# Altium footprint library IC_SMD_QUAD.PcbLib: 112 footprints (part 1 of 7)
Each footprint in its own frame and in the unit in brackets; x right, y up, seen from the top. Pads: shape width x height; smd on the part's side, far side on the other; paste and mask are expansions set on the pad; w line width, h text height; cw(c..) or ccw(c..) is an arc to the next point about the centre after c.
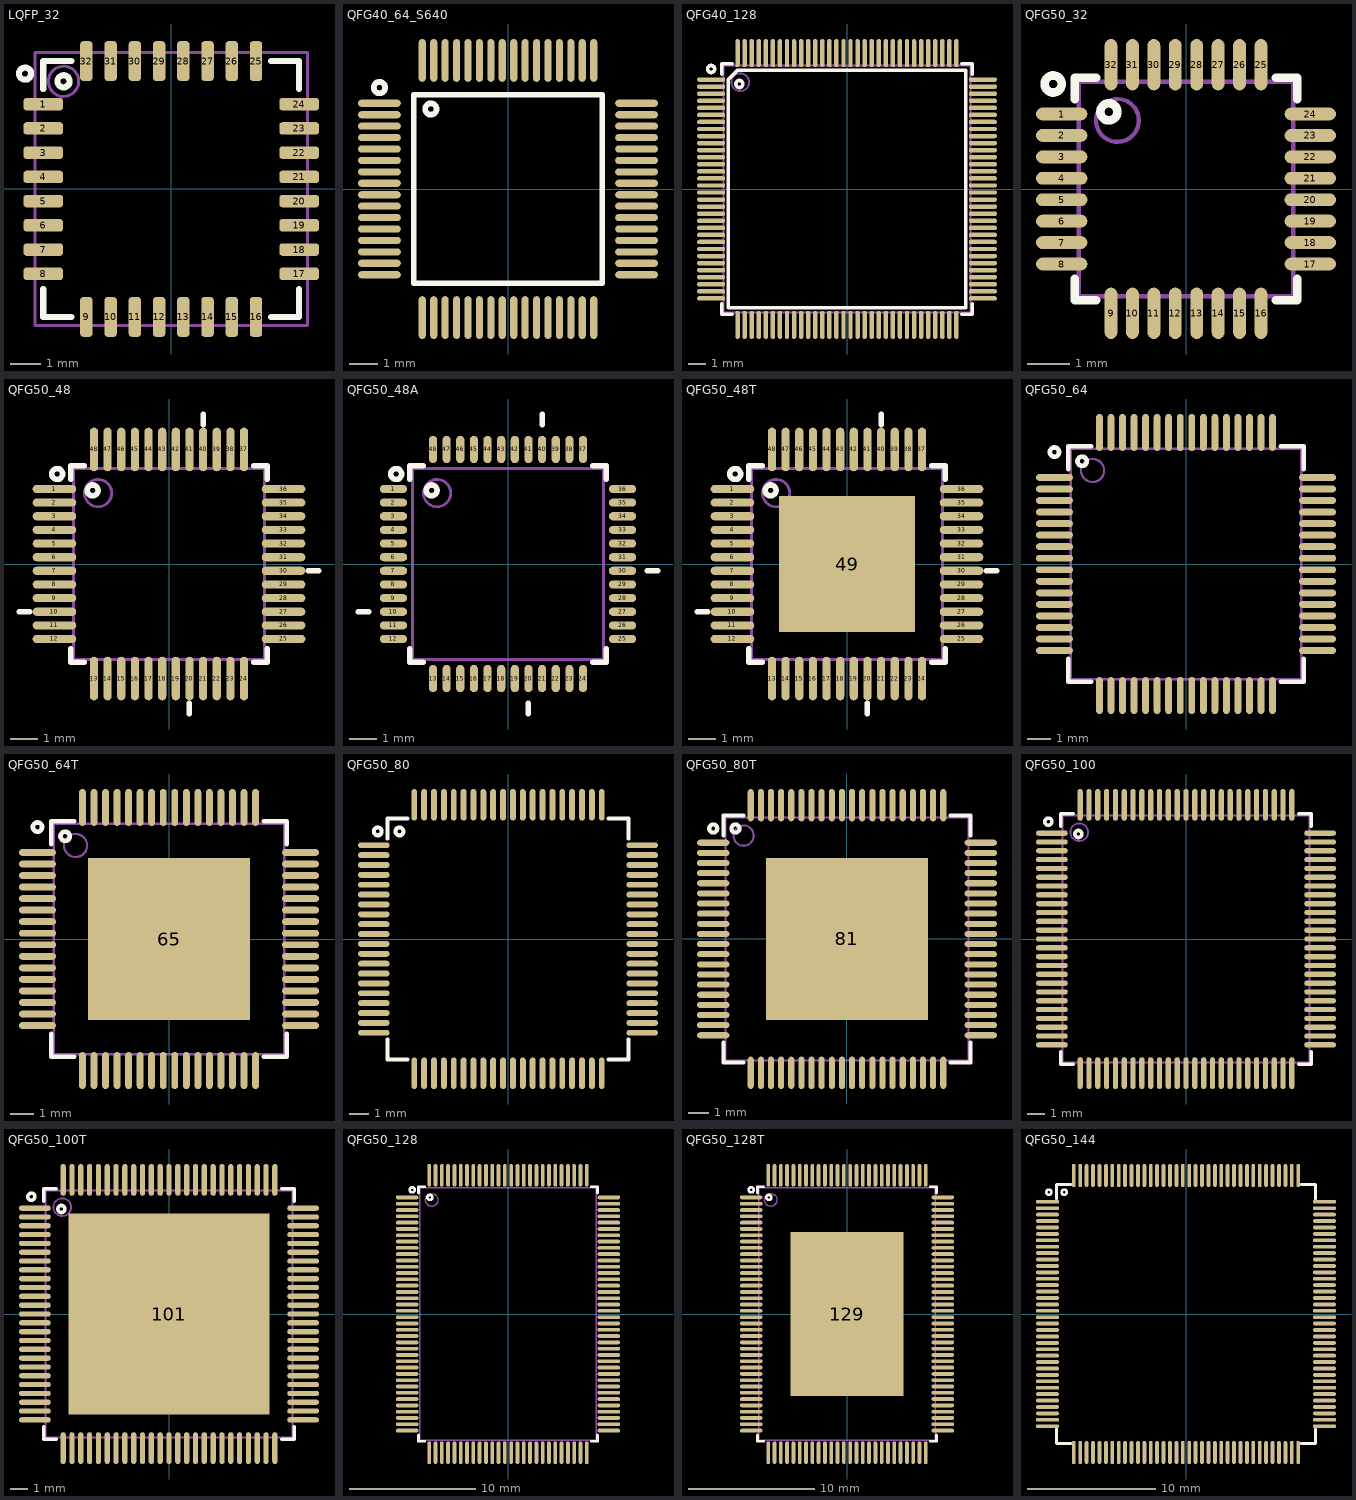
[diagram p0: the footprints below, top view; thin cyan lines are the x and y axes]

## LQFP_32 [mm] "LQFP 32-pin (7.0 x 7.0 x 1.4 mm)"
height 1
pads (32):
  rrect50% 1.31x0.41 smd mask+0.05: 1(-4.225,2.8) 2(-4.225,2) 3(-4.225,1.2) 4(-4.225,0.4) 5(-4.225,-0.4) 6(-4.225,-1.2) 7(-4.225,-2) 8(-4.225,-2.8) 17(4.225,-2.8) 18(4.225,-2) 19(4.225,-1.2) 20(4.225,-0.4) 21(4.225,0.4) 22(4.225,1.2) 23(4.225,2) 24(4.225,2.8)
  rrect50% 0.41x1.31 smd mask+0.05: 9(-2.8,-4.225) 10(-2,-4.225) 11(-1.2,-4.225) 12(-0.4,-4.225) 13(0.4,-4.225) 14(1.2,-4.225) 15(2,-4.225) 16(2.8,-4.225) 25(2.8,4.225) 26(2,4.225) 27(1.2,4.225) 28(0.4,4.225) 29(-0.4,4.225) 30(-1.2,4.225) 31(-2,4.225) 32(-2.8,4.225)
Top Overlay:
  circle w0.2: c-3.556,3.556 r0.2
  circle w0.2: c-4.826,3.81 r0.2
  lines w0.2: -4.225,-3.3 -4.225,-4.225 -3.3,-4.225 ; -4.225,3.3 -4.225,4.225 -3.3,4.225 ; 3.3,-4.225 4.225,-4.225 4.225,-3.3 ; 3.3,4.225 4.225,4.225 4.225,3.3
Top Designator:
  text ".Designator" at -3.71,-0.344 h1.52
Mechanical 13:
  circle w0.1: c-3.556,3.556 r0.5
  lines w0.1: -4.5,-4.5 -4.5,4.5 4.5,4.5 4.5,-4.5 -4.5,-4.5
3D body "lqfp32_7x7_p080.STEP": height 1.61, standoff -0.09, extent -4.5,-4.5 4.5,4.5

## QFG40_64_S640 [mm] "LQFP64, 6.4X6.4mm, 0.4mm"
pads (64):
  oval 1.5x0.25 smd mask+0.05: 1(-4.5,3) 2(-4.5,2.6) 3(-4.5,2.2) 4(-4.5,1.8) 5(-4.5,1.4) 6(-4.5,1) 7(-4.5,0.6) 8(-4.5,0.2) 9(-4.5,-0.2) 10(-4.5,-0.6) 11(-4.5,-1) 12(-4.5,-1.4) 13(-4.5,-1.8) 14(-4.5,-2.2) 15(-4.5,-2.6) 16(-4.5,-3) 33(4.5,-3) 34(4.5,-2.6) 35(4.5,-2.2) 36(4.5,-1.8) 37(4.5,-1.4) 38(4.5,-1) 39(4.5,-0.6) 40(4.5,-0.2) 41(4.5,0.2) 42(4.5,0.6) 43(4.5,1) 44(4.5,1.4) 45(4.5,1.8) 46(4.5,2.2) 47(4.5,2.6) 48(4.5,3)
  oval 0.25x1.5 smd mask+0.05: 17(-3,-4.5) 18(-2.6,-4.5) 19(-2.2,-4.5) 20(-1.8,-4.5) 21(-1.4,-4.5) 22(-1,-4.5) 23(-0.6,-4.5) 24(-0.2,-4.5) 25(0.2,-4.5) 26(0.6,-4.5) 27(1,-4.5) 28(1.4,-4.5) 29(1.8,-4.5) 30(2.2,-4.5) 31(2.6,-4.5) 32(3,-4.5) 49(3,4.5) 50(2.6,4.5) 51(2.2,4.5) 52(1.8,4.5) 53(1.4,4.5) 54(1,4.5) 55(0.6,4.5) 56(0.2,4.5) 57(-0.2,4.5) 58(-0.6,4.5) 59(-1,4.5) 60(-1.4,4.5) 61(-1.8,4.5) 62(-2.2,4.5) 63(-2.6,4.5) 64(-3,4.5)
Top Overlay:
  circle w0.2: c-4.5,3.549 r0.2
  circle w0.2: c-2.7,2.8 r0.2
  lines w0.2: -3.3,-3.3 -3.3,3.3 3.3,3.3 3.3,-3.3 -3.3,-3.3
Top Designator:
  text ".Designator" at -3.71,-0.344 h1.52

## QFG40_128 [mm] "LQFP128, PQFP-128, MS-026(JEDEC), 14X14mm, 0.4mm"
height 1.6
pads (128):
  oval 1.6x0.25 smd mask+0.1: 1(-7.7,6.2) 2(-7.7,5.8) 3(-7.7,5.4) 4(-7.7,5) 5(-7.7,4.6) 6(-7.7,4.2) 7(-7.7,3.8) 8(-7.7,3.4) 9(-7.7,3) 10(-7.7,2.6) 11(-7.7,2.2) 12(-7.7,1.8) 13(-7.7,1.4) 14(-7.7,1) 15(-7.7,0.6) 16(-7.7,0.2) 17(-7.7,-0.2) 18(-7.7,-0.6) 19(-7.7,-1) 20(-7.7,-1.4) 21(-7.7,-1.8) 22(-7.7,-2.2) 23(-7.7,-2.6) 24(-7.7,-3) 25(-7.7,-3.4) 26(-7.7,-3.8) 27(-7.7,-4.2) 28(-7.7,-4.6) 29(-7.7,-5) 30(-7.7,-5.4) 31(-7.7,-5.8) 32(-7.7,-6.2) 65(7.7,-6.2) 66(7.7,-5.8) 67(7.7,-5.4) 68(7.7,-5) 69(7.7,-4.6) 70(7.7,-4.2) 71(7.7,-3.8) 72(7.7,-3.4) 73(7.7,-3) 74(7.7,-2.6) 75(7.7,-2.2) 76(7.7,-1.8) 77(7.7,-1.4) 78(7.7,-1) 79(7.7,-0.6) 80(7.7,-0.2) 81(7.7,0.2) 82(7.7,0.6) 83(7.7,1) 84(7.7,1.4) 85(7.7,1.8) 86(7.7,2.2) 87(7.7,2.6) 88(7.7,3) 89(7.7,3.4) 90(7.7,3.8) 91(7.7,4.2) 92(7.7,4.6) 93(7.7,5) 94(7.7,5.4) 95(7.7,5.8) 96(7.7,6.2)
  oval 0.25x1.6 smd mask+0.1: 33(-6.2,-7.7) 34(-5.8,-7.7) 35(-5.4,-7.7) 36(-5,-7.7) 37(-4.6,-7.7) 38(-4.2,-7.7) 39(-3.8,-7.7) 40(-3.4,-7.7) 41(-3,-7.7) 42(-2.6,-7.7) 43(-2.2,-7.7) 44(-1.8,-7.7) 45(-1.4,-7.7) 46(-1,-7.7) 47(-0.6,-7.7) 48(-0.2,-7.7) 49(0.2,-7.7) 50(0.6,-7.7) 51(1,-7.7) 52(1.4,-7.7) 53(1.8,-7.7) 54(2.2,-7.7) 55(2.6,-7.7) 56(3,-7.7) 57(3.4,-7.7) 58(3.8,-7.7) 59(4.2,-7.7) 60(4.6,-7.7) 61(5,-7.7) 62(5.4,-7.7) 63(5.8,-7.7) 64(6.2,-7.7) 97(6.2,7.7) 98(5.8,7.7) 99(5.4,7.7) 100(5,7.7) 101(4.6,7.7) 102(4.2,7.7) 103(3.8,7.7) 104(3.4,7.7) 105(3,7.7) 106(2.6,7.7) 107(2.2,7.7) 108(1.8,7.7) 109(1.4,7.7) 110(1,7.7) 111(0.6,7.7) 112(0.2,7.7) 113(-0.2,7.7) 114(-0.6,7.7) 115(-1,7.7) 116(-1.4,7.7) 117(-1.8,7.7) 118(-2.2,7.7) 119(-2.6,7.7) 120(-3,7.7) 121(-3.4,7.7) 122(-3.8,7.7) 123(-4.2,7.7) 124(-4.6,7.7) 125(-5,7.7) 126(-5.4,7.7) 127(-5.8,7.7) 128(-6.2,7.7)
Top Overlay:
  circle w0.2: c-7.7,6.8 r0.2
  circle w0.2: c-6.1,5.949 r0.2
  lines w0.2: -7.1,-6.5 -7.1,-7.1 -6.5,-7.1 ; -7.1,6.5 -7.1,7.1 -6.5,7.1 ; 6.5,-7.1 7.1,-7.1 7.1,-6.5 ; 6.5,7.1 7.1,7.1 7.1,6.5 ; -6.719,-6.719 6.719,-6.719 6.719,6.719 -4.93,6.719 -6.211,6.719 -6.719,6.211 -6.719,4.93 -6.719,-6.719
Top Designator:
  text ".Designator" at -3.71,-0.344 h1.52
Mechanical 13:
  circle w0.1: c-6.05,6.05 r0.5
  lines w0.1: -7,-7 -7,7 7,7 7,-7 -7,-7
3D body "LQFP40P-128.STEP": height 1.35, standoff 0, extent -8,-8 8,8

## QFG50_32 [mm] "PBS TSQFP, 32-Leads, Body 5.00x5.00mm, Pitch 0.50mm"
height 1
pads (32):
  oval 1.2x0.3 smd mask+0.05: 1(-2.9,1.75) 2(-2.9,1.25) 3(-2.9,0.75) 4(-2.9,0.25) 5(-2.9,-0.25) 6(-2.9,-0.75) 7(-2.9,-1.25) 8(-2.9,-1.75) 17(2.9,-1.75) 18(2.9,-1.25) 19(2.9,-0.75) 20(2.9,-0.25) 21(2.9,0.25) 22(2.9,0.75) 23(2.9,1.25) 24(2.9,1.75)
  oval 0.3x1.2 smd mask+0.05: 9(-1.75,-2.9) 10(-1.25,-2.9) 11(-0.75,-2.9) 12(-0.25,-2.9) 13(0.25,-2.9) 14(0.75,-2.9) 15(1.25,-2.9) 16(1.75,-2.9) 25(1.75,2.9) 26(1.25,2.9) 27(0.75,2.9) 28(0.25,2.9) 29(-0.25,2.9) 30(-0.75,2.9) 31(-1.25,2.9) 32(-1.75,2.9)
Top Overlay:
  circle w0.2: c-1.8,1.8 r0.2
  circle w0.2: c-3.1,2.45 r0.2
  lines w0.2: -2.6,-2.1 -2.6,-2.6 -2.1,-2.6 ; -2.6,2.1 -2.6,2.6 -2.1,2.6 ; 2.1,-2.6 2.6,-2.6 2.6,-2.1 ; 2.1,2.6 2.6,2.6 2.6,2.1
Top Designator:
  text ".Designator" at -3.71,-0.344 h1.52
Mechanical 13:
  circle w0.1: c-1.6,1.6 r0.5
  lines w0.1: -2.5,-2.5 2.5,-2.5 2.5,2.5 -2.5,2.5 -2.5,-2.5
3D body "QFG50_32_.step": height 1, standoff 0, extent -3,-3 3,3

## QFG50_48 [mm] "LQFP48, PQFF, PQFG, TSQFP, 48-Leads, Body 7.00x7.00mm, Pitch 0.50mm"
height 1.6
pads (48):
  oval 1.6x0.3 smd mask+0.05: 1(-4.2,2.75) 2(-4.2,2.25) 3(-4.2,1.75) 4(-4.2,1.25) 5(-4.2,0.75) 6(-4.2,0.25) 7(-4.2,-0.25) 8(-4.2,-0.75) 9(-4.2,-1.25) 10(-4.2,-1.75) 11(-4.2,-2.25) 12(-4.2,-2.75) 25(4.2,-2.75) 26(4.2,-2.25) 27(4.2,-1.75) 28(4.2,-1.25) 29(4.2,-0.75) 30(4.2,-0.25) 31(4.2,0.25) 32(4.2,0.75) 33(4.2,1.25) 34(4.2,1.75) 35(4.2,2.25) 36(4.2,2.75)
  oval 0.3x1.6 smd mask+0.05: 13(-2.75,-4.2) 14(-2.25,-4.2) 15(-1.75,-4.2) 16(-1.25,-4.2) 17(-0.75,-4.2) 18(-0.25,-4.2) 19(0.25,-4.2) 20(0.75,-4.2) 21(1.25,-4.2) 22(1.75,-4.2) 23(2.25,-4.2) 24(2.75,-4.2) 37(2.75,4.2) 38(2.25,4.2) 39(1.75,4.2) 40(1.25,4.2) 41(0.75,4.2) 42(0.25,4.2) 43(-0.25,4.2) 44(-0.75,4.2) 45(-1.25,4.2) 46(-1.75,4.2) 47(-2.25,4.2) 48(-2.75,4.2)
Top Overlay:
  circle w0.2: c-4.1,3.3 r0.2
  circle w0.2: c-2.8,2.7 r0.2
  lines w0.2: -5.5,-1.75 -5.1,-1.75 ; -3.6,-3.1 -3.6,-3.6 -3.1,-3.6 ; -3.6,3.1 -3.6,3.6 -3.1,3.6 ; 0.75,-5.5 0.75,-5.1 ; 1.25,5.1 1.25,5.5 ; 3.1,-3.6 3.6,-3.6 3.6,-3.1 ; 3.1,3.6 3.6,3.6 3.6,3.1 ; 5.1,-0.25 5.5,-0.25
Top Designator:
  text ".Designator" at -3.71,-0.344 h1.52
Mechanical 13:
  circle w0.1: c-2.6,2.6 r0.5
  lines w0.1: -3.5,-3.5 -3.5,3.5 3.5,3.5 3.5,-3.5 -3.5,-3.5
3D body "LQFP48_Grid_0_5.STEP": height 1.6, standoff 0, extent -4.5,-4.5 4.5,4.5

## QFG50_48A [mm] "LQFP48, PQFF, PQFG, TSQFP, 48-Leads, Body 7.00x7.00mm, Pitch 0.50mm"
height 1.6
pads (48):
  oval 1x0.3 smd mask+0.05: 1(-4.2,2.75) 2(-4.2,2.25) 3(-4.2,1.75) 4(-4.2,1.25) 5(-4.2,0.75) 6(-4.2,0.25) 7(-4.2,-0.25) 8(-4.2,-0.75) 9(-4.2,-1.25) 10(-4.2,-1.75) 11(-4.2,-2.25) 12(-4.2,-2.75) 25(4.2,-2.75) 26(4.2,-2.25) 27(4.2,-1.75) 28(4.2,-1.25) 29(4.2,-0.75) 30(4.2,-0.25) 31(4.2,0.25) 32(4.2,0.75) 33(4.2,1.25) 34(4.2,1.75) 35(4.2,2.25) 36(4.2,2.75)
  oval 0.3x1 smd mask+0.05: 13(-2.75,-4.2) 14(-2.25,-4.2) 15(-1.75,-4.2) 16(-1.25,-4.2) 17(-0.75,-4.2) 18(-0.25,-4.2) 19(0.25,-4.2) 20(0.75,-4.2) 21(1.25,-4.2) 22(1.75,-4.2) 23(2.25,-4.2) 24(2.75,-4.2) 37(2.75,4.2) 38(2.25,4.2) 39(1.75,4.2) 40(1.25,4.2) 41(0.75,4.2) 42(0.25,4.2) 43(-0.25,4.2) 44(-0.75,4.2) 45(-1.25,4.2) 46(-1.75,4.2) 47(-2.25,4.2) 48(-2.75,4.2)
Top Overlay:
  circle w0.2: c-2.8,2.7 r0.2
  circle w0.2: c-4.1,3.3 r0.2
  lines w0.2: -5.5,-1.75 -5.1,-1.75 ; -3.6,-3.1 -3.6,-3.6 -3.1,-3.6 ; -3.6,3.1 -3.6,3.6 -3.1,3.6 ; 0.75,-5.5 0.75,-5.1 ; 1.25,5.1 1.25,5.5 ; 3.1,-3.6 3.6,-3.6 3.6,-3.1 ; 3.1,3.6 3.6,3.6 3.6,3.1 ; 5.1,-0.25 5.5,-0.25
Top Designator:
  text ".Designator" at -3.71,-0.344 h1.52
Mechanical 13:
  circle w0.1: c-2.6,2.6 r0.5
  lines w0.1: -3.5,-3.5 3.5,-3.5 3.5,3.5 -3.5,3.5 -3.5,-3.5
3D body "LQFP48_Grid_0_5.STEP": height 1.6, standoff 0, extent -4.5,-4.5 4.5,4.5

## QFG50_48T [mm] "LQFP48P, SV-48, MS-026-ABC(JEDEC), 7.0X7.0mm, Pitch: 0.5mm"
pads (49):
  oval 1.6x0.3 smd mask+0.05: 1(-4.2,2.75) 2(-4.2,2.25) 3(-4.2,1.75) 4(-4.2,1.25) 5(-4.2,0.75) 6(-4.2,0.25) 7(-4.2,-0.25) 8(-4.2,-0.75) 9(-4.2,-1.25) 10(-4.2,-1.75) 11(-4.2,-2.25) 12(-4.2,-2.75) 25(4.2,-2.75) 26(4.2,-2.25) 27(4.2,-1.75) 28(4.2,-1.25) 29(4.2,-0.75) 30(4.2,-0.25) 31(4.2,0.25) 32(4.2,0.75) 33(4.2,1.25) 34(4.2,1.75) 35(4.2,2.25) 36(4.2,2.75)
  oval 0.3x1.6 smd mask+0.05: 13(-2.75,-4.2) 14(-2.25,-4.2) 15(-1.75,-4.2) 16(-1.25,-4.2) 17(-0.75,-4.2) 18(-0.25,-4.2) 19(0.25,-4.2) 20(0.75,-4.2) 21(1.25,-4.2) 22(1.75,-4.2) 23(2.25,-4.2) 24(2.75,-4.2) 37(2.75,4.2) 38(2.25,4.2) 39(1.75,4.2) 40(1.25,4.2) 41(0.75,4.2) 42(0.25,4.2) 43(-0.25,4.2) 44(-0.75,4.2) 45(-1.25,4.2) 46(-1.75,4.2) 47(-2.25,4.2) 48(-2.75,4.2)
  rect 5x5 smd paste-5 mask+0.1: 49(0,0)
Top Overlay:
  circle w0.2: c-2.8,2.7 r0.2
  circle w0.2: c-4.1,3.3 r0.2
  lines w0.2: -5.5,-1.75 -5.1,-1.75 ; -3.6,-3.1 -3.6,-3.6 -3.1,-3.6 ; -3.6,3.1 -3.6,3.6 -3.1,3.6 ; 0.75,-5.5 0.75,-5.1 ; 1.25,5.1 1.25,5.5 ; 3.1,-3.6 3.6,-3.6 3.6,-3.1 ; 3.1,3.6 3.6,3.6 3.6,3.1 ; 5.1,-0.25 5.5,-0.25
Top Paste:
  rectangle: -1.2,-1.2 -0.2,-0.2
  rectangle: -2.4,-2.4 -1.4,-1.4
  region: -0.2,-1.4 -1.2,-1.4 -1.2,-2.4 -0.2,-2.4
  rectangle: -2.4,-1.2 -1.4,-0.2
  region: 2.4,-0.2 1.4,-0.2 1.4,-1.2 2.4,-1.2
  rectangle: 0.2,-2.4 1.2,-1.4
  region: 2.4,-1.4 1.4,-1.4 1.4,-2.4 2.4,-2.4
  region: 1.2,-0.2 0.2,-0.2 0.2,-1.2 1.2,-1.2
  region: 1.2,1.2 0.2,1.2 0.2,0.2 1.2,0.2
  region: 2.4,2.4 1.4,2.4 1.4,1.4 2.4,1.4
  rectangle: 0.2,1.4 1.2,2.4
  region: 2.4,1.2 1.4,1.2 1.4,0.2 2.4,0.2
  rectangle: -2.4,0.2 -1.4,1.2
  region: -0.2,2.4 -1.2,2.4 -1.2,1.4 -0.2,1.4
  rectangle: -2.4,1.4 -1.4,2.4
  rectangle: -1.2,0.2 -0.2,1.2
Top Solder:
  drawing of 9 lines, arcs and shapes, not listed
Top Designator:
  text ".Designator" at -3.71,-0.344 h1.52
Mechanical 13:
  circle w0.1: c-2.6,2.6 r0.5
  lines w0.1: -3.5,-3.5 3.5,-3.5 3.5,3.5 -3.5,3.5 -3.5,-3.5
3D body "LQFP48_Grid_0_5.STEP": height 1.6, standoff 0, extent -4.5,-4.5 4.5,4.5

## QFG50_64 [mm] "A64 (CYPRESS), TQFP64, LQFP64, VQ44, VQG44, 10X10mm, Pitch: 0.5mm"
height 1.2
pads (64):
  oval 1.6x0.3 smd mask+0.05: 1(-5.7,3.75) 2(-5.7,3.25) 3(-5.7,2.75) 4(-5.7,2.25) 5(-5.7,1.75) 6(-5.7,1.25) 7(-5.7,0.75) 8(-5.7,0.25) 9(-5.7,-0.25) 10(-5.7,-0.75) 11(-5.7,-1.25) 12(-5.7,-1.75) 13(-5.7,-2.25) 14(-5.7,-2.75) 15(-5.7,-3.25) 16(-5.7,-3.75) 33(5.7,-3.75) 34(5.7,-3.25) 35(5.7,-2.75) 36(5.7,-2.25) 37(5.7,-1.75) 38(5.7,-1.25) 39(5.7,-0.75) 40(5.7,-0.25) 41(5.7,0.25) 42(5.7,0.75) 43(5.7,1.25) 44(5.7,1.75) 45(5.7,2.25) 46(5.7,2.75) 47(5.7,3.25) 48(5.7,3.75)
  oval 0.3x1.6 smd mask+0.05: 17(-3.75,-5.7) 18(-3.25,-5.7) 19(-2.75,-5.7) 20(-2.25,-5.7) 21(-1.75,-5.7) 22(-1.25,-5.7) 23(-0.75,-5.7) 24(-0.25,-5.7) 25(0.25,-5.7) 26(0.75,-5.7) 27(1.25,-5.7) 28(1.75,-5.7) 29(2.25,-5.7) 30(2.75,-5.7) 31(3.25,-5.7) 32(3.75,-5.7) 49(3.75,5.7) 50(3.25,5.7) 51(2.75,5.7) 52(2.25,5.7) 53(1.75,5.7) 54(1.25,5.7) 55(0.75,5.7) 56(0.25,5.7) 57(-0.25,5.7) 58(-0.75,5.7) 59(-1.25,5.7) 60(-1.75,5.7) 61(-2.25,5.7) 62(-2.75,5.7) 63(-3.25,5.7) 64(-3.75,5.7)
Top Overlay:
  circle w0.2: c-5.7,4.849 r0.2
  circle w0.2: c-4.5,4.449 r0.2
  lines w0.2: -5.1,-4.1 -5.1,-5.1 -4.1,-5.1 ; -5.1,4.1 -5.1,5.1 -4.1,5.1 ; 4.1,-5.1 5.1,-5.1 5.1,-4.1 ; 4.1,5.1 5.1,5.1 5.1,4.1
Top Designator:
  text ".Designator" at -3.71,-0.344 h1.52
Mechanical 15:
  circle w0.1: c-4.05,4.05 r0.5
  lines w0.1: -5,-5 -5,5 5,5 5,-5 -5,-5
3D body "LQFP-64.step": height 1.6, standoff 0, extent -6,-6 6,6

## QFG50_64T [mm] "PowerPad PAP (TI) HTQFP 64PIN 10X10mm, Pitch: 0.5mm"
height 1
pads (65):
  oval 1.6x0.3 smd mask+0.05: 1(-5.7,3.75) 2(-5.7,3.25) 3(-5.7,2.75) 4(-5.7,2.25) 5(-5.7,1.75) 6(-5.7,1.25) 7(-5.7,0.75) 8(-5.7,0.25) 9(-5.7,-0.25) 10(-5.7,-0.75) 11(-5.7,-1.25) 12(-5.7,-1.75) 13(-5.7,-2.25) 14(-5.7,-2.75) 15(-5.7,-3.25) 16(-5.7,-3.75) 33(5.7,-3.75) 34(5.7,-3.25) 35(5.7,-2.75) 36(5.7,-2.25) 37(5.7,-1.75) 38(5.7,-1.25) 39(5.7,-0.75) 40(5.7,-0.25) 41(5.7,0.25) 42(5.7,0.75) 43(5.7,1.25) 44(5.7,1.75) 45(5.7,2.25) 46(5.7,2.75) 47(5.7,3.25) 48(5.7,3.75)
  oval 0.3x1.6 smd mask+0.05: 17(-3.75,-5.7) 18(-3.25,-5.7) 19(-2.75,-5.7) 20(-2.25,-5.7) 21(-1.75,-5.7) 22(-1.25,-5.7) 23(-0.75,-5.7) 24(-0.25,-5.7) 25(0.25,-5.7) 26(0.75,-5.7) 27(1.25,-5.7) 28(1.75,-5.7) 29(2.25,-5.7) 30(2.75,-5.7) 31(3.25,-5.7) 32(3.75,-5.7) 49(3.75,5.7) 50(3.25,5.7) 51(2.75,5.7) 52(2.25,5.7) 53(1.75,5.7) 54(1.25,5.7) 55(0.75,5.7) 56(0.25,5.7) 57(-0.25,5.7) 58(-0.75,5.7) 59(-1.25,5.7) 60(-1.75,5.7) 61(-2.25,5.7) 62(-2.75,5.7) 63(-3.25,5.7) 64(-3.75,5.7)
  rect 7x7 smd paste-7 mask+0.1: 65(0,0)
Top Overlay:
  circle w0.2: c-4.5,4.449 r0.2
  circle w0.2: c-5.7,4.849 r0.2
  lines w0.2: -5.1,-4.1 -5.1,-5.1 -4.1,-5.1 ; -5.1,4.1 -5.1,5.1 -4.1,5.1 ; 4.1,-5.1 5.1,-5.1 5.1,-4.1 ; 4.1,5.1 5.1,5.1 5.1,4.1
Top Paste:
  rectangle: -1.6,-1.6 -0.2,-0.2
  rectangle: -3.4,-3.4 -2,-2
  region: -0.2,-2 -1.6,-2 -1.6,-3.4 -0.2,-3.4
  rectangle: -3.4,-1.6 -2,-0.2
  region: 3.4,-0.2 2,-0.2 2,-1.6 3.4,-1.6
  rectangle: 0.2,-3.4 1.6,-2
  region: 3.4,-2 2,-2 2,-3.4 3.4,-3.4
  region: 1.6,-0.2 0.2,-0.2 0.2,-1.6 1.6,-1.6
  region: 1.6,1.6 0.2,1.6 0.2,0.2 1.6,0.2
  region: 3.4,3.4 2,3.4 2,2 3.4,2
  rectangle: 0.2,2 1.6,3.4
  region: 3.4,1.6 2,1.6 2,0.2 3.4,0.2
  rectangle: -3.4,0.2 -2,1.6
  region: -0.2,3.4 -1.6,3.4 -1.6,2 -0.2,2
  rectangle: -3.4,2 -2,3.4
  rectangle: -1.6,0.2 -0.2,1.6
Top Designator:
  text ".Designator" at -3.71,-0.344 h1.52
Mechanical 13:
  circle w0.1: c-4.05,4.05 r0.5
  lines w0.1: -5,-5 -5,5 5,5 5,-5 -5,-5
3D body "LQFP-64.step": height 1.6, standoff 0, extent -6,-6 6,6

## QFG50_80 [mm] "lqfp80, TFP-80C (Hitachi), 12.0x12.0mm, Pitch 0.5mm"
pads (80):
  oval 1.6x0.3 smd mask+0.05: 1(-6.8,4.75) 2(-6.8,4.25) 3(-6.8,3.75) 4(-6.8,3.25) 5(-6.8,2.75) 6(-6.8,2.25) 7(-6.8,1.75) 8(-6.8,1.25) 9(-6.8,0.75) 10(-6.8,0.25) 11(-6.8,-0.25) 12(-6.8,-0.75) 13(-6.8,-1.25) 14(-6.8,-1.75) 15(-6.8,-2.25) 16(-6.8,-2.75) 17(-6.8,-3.25) 18(-6.8,-3.75) 19(-6.8,-4.25) 20(-6.8,-4.75) 41(6.8,-4.75) 42(6.8,-4.25) 43(6.8,-3.75) 44(6.8,-3.25) 45(6.8,-2.75) 46(6.8,-2.25) 47(6.8,-1.75) 48(6.8,-1.25) 49(6.8,-0.75) 50(6.8,-0.25) 51(6.8,0.25) 52(6.8,0.75) 53(6.8,1.25) 54(6.8,1.75) 55(6.8,2.25) 56(6.8,2.75) 57(6.8,3.25) 58(6.8,3.75) 59(6.8,4.25) 60(6.8,4.75)
  oval 0.3x1.6 smd mask+0.05: 21(-4.75,-6.8) 22(-4.25,-6.8) 23(-3.75,-6.8) 24(-3.25,-6.8) 25(-2.75,-6.8) 26(-2.25,-6.8) 27(-1.75,-6.8) 28(-1.25,-6.8) 29(-0.75,-6.8) 30(-0.25,-6.8) 31(0.25,-6.8) 32(0.75,-6.8) 33(1.25,-6.8) 34(1.75,-6.8) 35(2.25,-6.8) 36(2.75,-6.8) 37(3.25,-6.8) 38(3.75,-6.8) 39(4.25,-6.8) 40(4.75,-6.8) 61(4.75,6.8) 62(4.25,6.8) 63(3.75,6.8) 64(3.25,6.8) 65(2.75,6.8) 66(2.25,6.8) 67(1.75,6.8) 68(1.25,6.8) 69(0.75,6.8) 70(0.25,6.8) 71(-0.25,6.8) 72(-0.75,6.8) 73(-1.25,6.8) 74(-1.75,6.8) 75(-2.25,6.8) 76(-2.75,6.8) 77(-3.25,6.8) 78(-3.75,6.8) 79(-4.25,6.8) 80(-4.75,6.8)
Top Overlay:
  circle w0.2: c-5.5,5.45 r0.2
  circle w0.2: c-6.6,5.45 r0.2
  lines w0.2: -6.1,-5.1 -6.1,-6.1 -5.1,-6.1 ; -6.1,5.1 -6.1,6.1 -5.1,6.1 ; 5.1,-6.1 6.1,-6.1 6.1,-5.1 ; 5.1,6.1 6.1,6.1 6.1,5.1
Top Designator:
  text ".Designator" at -3.71,-0.344 h1.52
3D body "User Library-LQFP80-2.STEP": height 1.62, standoff -0.01, extent -7.072,-7.072 7.072,7.072

## QFG50_80T [mm] "HTQFP-80-Leads, Body 12.0x12.0mm, Pitch 0.5mm, Thermal Pad 8.0x8.0mm"
height 1
pads (81):
  oval 1.6x0.3 smd mask+0.05: 1(-6.6,4.75) 2(-6.6,4.25) 3(-6.6,3.75) 4(-6.6,3.25) 5(-6.6,2.75) 6(-6.6,2.25) 7(-6.6,1.75) 8(-6.6,1.25) 9(-6.6,0.75) 10(-6.6,0.25) 11(-6.6,-0.25) 12(-6.6,-0.75) 13(-6.6,-1.25) 14(-6.6,-1.75) 15(-6.6,-2.25) 16(-6.6,-2.75) 17(-6.6,-3.25) 18(-6.6,-3.75) 19(-6.6,-4.25) 20(-6.6,-4.75) 41(6.6,-4.75) 42(6.6,-4.25) 43(6.6,-3.75) 44(6.6,-3.25) 45(6.6,-2.75) 46(6.6,-2.25) 47(6.6,-1.75) 48(6.6,-1.25) 49(6.6,-0.75) 50(6.6,-0.25) 51(6.6,0.25) 52(6.6,0.75) 53(6.6,1.25) 54(6.6,1.75) 55(6.6,2.25) 56(6.6,2.75) 57(6.6,3.25) 58(6.6,3.75) 59(6.6,4.25) 60(6.6,4.75)
  oval 0.3x1.6 smd mask+0.05: 21(-4.75,-6.6) 22(-4.25,-6.6) 23(-3.75,-6.6) 24(-3.25,-6.6) 25(-2.75,-6.6) 26(-2.25,-6.6) 27(-1.75,-6.6) 28(-1.25,-6.6) 29(-0.75,-6.6) 30(-0.25,-6.6) 31(0.25,-6.6) 32(0.75,-6.6) 33(1.25,-6.6) 34(1.75,-6.6) 35(2.25,-6.6) 36(2.75,-6.6) 37(3.25,-6.6) 38(3.75,-6.6) 39(4.25,-6.6) 40(4.75,-6.6) 61(4.75,6.6) 62(4.25,6.6) 63(3.75,6.6) 64(3.25,6.6) 65(2.75,6.6) 66(2.25,6.6) 67(1.75,6.6) 68(1.25,6.6) 69(0.75,6.6) 70(0.25,6.6) 71(-0.25,6.6) 72(-0.75,6.6) 73(-1.25,6.6) 74(-1.75,6.6) 75(-2.25,6.6) 76(-2.75,6.6) 77(-3.25,6.6) 78(-3.75,6.6) 79(-4.25,6.6) 80(-4.75,6.6)
  rect 8x8 smd paste-8 mask+0.1: 81(0,0)
Top Overlay:
  circle w0.2: c-6.6,5.45 r0.2
  circle w0.2: c-5.5,5.45 r0.2
  lines w0.2: -6.1,-5.1 -6.1,-6.1 -5.1,-6.1 ; -6.1,5.1 -6.1,6.1 -5.1,6.1 ; 5.1,-6.1 6.1,-6.1 6.1,-5.1 ; 5.1,6.1 6.1,6.1 6.1,5.1
Top Paste:
  rectangle: -1.6,0.2 -0.2,1.6
  rectangle: -3.4,2 -2,3.4
  region: -0.2,3.4 -1.6,3.4 -1.6,2 -0.2,2
  rectangle: -3.4,0.2 -2,1.6
  region: 3.4,1.6 2,1.6 2,0.2 3.4,0.2
  rectangle: 0.2,2 1.6,3.4
  region: 3.4,3.4 2,3.4 2,2 3.4,2
  region: 1.6,1.6 0.2,1.6 0.2,0.2 1.6,0.2
  rectangle: -1.6,-1.6 -0.2,-0.2
  rectangle: -3.4,-3.4 -2,-2
  region: -0.2,-2 -1.6,-2 -1.6,-3.4 -0.2,-3.4
  rectangle: -3.4,-1.6 -2,-0.2
  region: 3.4,-0.2 2,-0.2 2,-1.6 3.4,-1.6
  rectangle: 0.2,-3.4 1.6,-2
  region: 3.4,-2 2,-2 2,-3.4 3.4,-3.4
  region: 1.6,-0.2 0.2,-0.2 0.2,-1.6 1.6,-1.6
Keep-Out Layer:
  drawing of 25 lines, arcs and shapes, not listed
Top Designator:
  text ".Designator" at -3.71,-0.344 h1.52
Mechanical 13:
  circle w0.1: c-5.1,5.1 r0.5
  lines w0.1: -6,-6 -6,6 6,6 6,-6 -6,-6
3D body "User Library-LQFP80-2.STEP": height 1.62, standoff -0.01, extent -7.072,-7.072 7.072,7.072

## QFG50_100 [mm] "LQFP100, PQFP100, A100 (Cypress), TQ100/VQ100 (Xilinx), 14.0x14.0mm, Pitch 0.5mm, HT100, HTG100"
height 1.2
pads (100):
  oval 1.8x0.3 smd mask+0.05: 1(-7.6,6) 2(-7.6,5.5) 3(-7.6,5) 4(-7.6,4.5) 5(-7.6,4) 6(-7.6,3.5) 7(-7.6,3) 8(-7.6,2.5) 9(-7.6,2) 10(-7.6,1.5) 11(-7.6,1) 12(-7.6,0.5) 13(-7.6,0) 14(-7.6,-0.5) 15(-7.6,-1) 16(-7.6,-1.5) 17(-7.6,-2) 18(-7.6,-2.5) 19(-7.6,-3) 20(-7.6,-3.5) 21(-7.6,-4) 22(-7.6,-4.5) 23(-7.6,-5) 24(-7.6,-5.5) 25(-7.6,-6) 51(7.6,-6) 52(7.6,-5.5) 53(7.6,-5) 54(7.6,-4.5) 55(7.6,-4) 56(7.6,-3.5) 57(7.6,-3) 58(7.6,-2.5) 59(7.6,-2) 60(7.6,-1.5) 61(7.6,-1) 62(7.6,-0.5) 63(7.6,0) 64(7.6,0.5) 65(7.6,1) 66(7.6,1.5) 67(7.6,2) 68(7.6,2.5) 69(7.6,3) 70(7.6,3.5) 71(7.6,4) 72(7.6,4.5) 73(7.6,5) 74(7.6,5.5) 75(7.6,6)
  oval 0.3x1.8 smd mask+0.05: 26(-6,-7.6) 27(-5.5,-7.6) 28(-5,-7.6) 29(-4.5,-7.6) 30(-4,-7.6) 31(-3.5,-7.6) 32(-3,-7.6) 33(-2.5,-7.6) 34(-2,-7.6) 35(-1.5,-7.6) 36(-1,-7.6) 37(-0.5,-7.6) 38(0,-7.6) 39(0.5,-7.6) 40(1,-7.6) 41(1.5,-7.6) 42(2,-7.6) 43(2.5,-7.6) 44(3,-7.6) 45(3.5,-7.6) 46(4,-7.6) 47(4.5,-7.6) 48(5,-7.6) 49(5.5,-7.6) 50(6,-7.6) 76(6,7.6) 77(5.5,7.6) 78(5,7.6) 79(4.5,7.6) 80(4,7.6) 81(3.5,7.6) 82(3,7.6) 83(2.5,7.6) 84(2,7.6) 85(1.5,7.6) 86(1,7.6) 87(0.5,7.6) 88(0,7.6) 89(-0.5,7.6) 90(-1,7.6) 91(-1.5,7.6) 92(-2,7.6) 93(-2.5,7.6) 94(-3,7.6) 95(-3.5,7.6) 96(-4,7.6) 97(-4.5,7.6) 98(-5,7.6) 99(-5.5,7.6) 100(-6,7.6)
Top Overlay:
  circle w0.2: c-7.8,6.649 r0.2
  circle w0.2: c-6.1,5.949 r0.2
  lines w0.2: -7.1,-6.4 -7.1,-7.1 -6.4,-7.1 ; -7.1,6.4 -7.1,7.1 -6.4,7.1 ; 6.4,-7.1 7.1,-7.1 7.1,-6.4 ; 6.4,7.1 7.1,7.1 7.1,6.4
Top Designator:
  text ".Designator" at -3.71,-0.344 h1.52
Mechanical 13:
  circle w0.1: c-6.05,6.05 r0.5
  lines w0.1: -7,-7 7,-7 7,7 -7,7 -7,-7
3D body "User Library-IPC QFP-ful100l.step": height 1.15, standoff 0, extent -8.014,-8.014 8.014,8.014

## QFG50_100T [mm] "LQFP100P, 14.0x14.0mm, Pitch 0.5mm"
height 1.2
pads (101):
  oval 1.8x0.3 smd mask+0.05: 1(-7.6,6) 2(-7.6,5.5) 3(-7.6,5) 4(-7.6,4.5) 5(-7.6,4) 6(-7.6,3.5) 7(-7.6,3) 8(-7.6,2.5) 9(-7.6,2) 10(-7.6,1.5) 11(-7.6,1) 12(-7.6,0.5) 13(-7.6,0) 14(-7.6,-0.5) 15(-7.6,-1) 16(-7.6,-1.5) 17(-7.6,-2) 18(-7.6,-2.5) 19(-7.6,-3) 20(-7.6,-3.5) 21(-7.6,-4) 22(-7.6,-4.5) 23(-7.6,-5) 24(-7.6,-5.5) 25(-7.6,-6) 51(7.6,-6) 52(7.6,-5.5) 53(7.6,-5) 54(7.6,-4.5) 55(7.6,-4) 56(7.6,-3.5) 57(7.6,-3) 58(7.6,-2.5) 59(7.6,-2) 60(7.6,-1.5) 61(7.6,-1) 62(7.6,-0.5) 63(7.6,0) 64(7.6,0.5) 65(7.6,1) 66(7.6,1.5) 67(7.6,2) 68(7.6,2.5) 69(7.6,3) 70(7.6,3.5) 71(7.6,4) 72(7.6,4.5) 73(7.6,5) 74(7.6,5.5) 75(7.6,6)
  oval 0.3x1.8 smd mask+0.05: 26(-6,-7.6) 27(-5.5,-7.6) 28(-5,-7.6) 29(-4.5,-7.6) 30(-4,-7.6) 31(-3.5,-7.6) 32(-3,-7.6) 33(-2.5,-7.6) 34(-2,-7.6) 35(-1.5,-7.6) 36(-1,-7.6) 37(-0.5,-7.6) 38(0,-7.6) 39(0.5,-7.6) 40(1,-7.6) 41(1.5,-7.6) 42(2,-7.6) 43(2.5,-7.6) 44(3,-7.6) 45(3.5,-7.6) 46(4,-7.6) 47(4.5,-7.6) 48(5,-7.6) 49(5.5,-7.6) 50(6,-7.6) 76(6,7.6) 77(5.5,7.6) 78(5,7.6) 79(4.5,7.6) 80(4,7.6) 81(3.5,7.6) 82(3,7.6) 83(2.5,7.6) 84(2,7.6) 85(1.5,7.6) 86(1,7.6) 87(0.5,7.6) 88(0,7.6) 89(-0.5,7.6) 90(-1,7.6) 91(-1.5,7.6) 92(-2,7.6) 93(-2.5,7.6) 94(-3,7.6) 95(-3.5,7.6) 96(-4,7.6) 97(-4.5,7.6) 98(-5,7.6) 99(-5.5,7.6) 100(-6,7.6)
  rect 11.4x11.4 smd paste-10 mask+0.1: 101(0,0)
Top Overlay:
  circle w0.2: c-6.1,5.949 r0.2
  circle w0.2: c-7.8,6.649 r0.2
  lines w0.2: -7.1,-6.4 -7.1,-7.1 -6.4,-7.1 ; -7.1,6.4 -7.1,7.1 -6.4,7.1 ; 6.4,-7.1 7.1,-7.1 7.1,-6.4 ; 6.4,7.1 7.1,7.1 7.1,6.4
Top Paste:
  region: 1.6,1.6 0.2,1.6 0.2,0.2 1.6,0.2
  region: 3.4,3.4 2,3.4 2,2 3.4,2
  rectangle: 0.2,2 1.6,3.4
  region: 3.4,1.6 2,1.6 2,0.2 3.4,0.2
  rectangle: -3.4,0.2 -2,1.6
  region: -0.2,3.4 -1.6,3.4 -1.6,2 -0.2,2
  rectangle: -3.4,2 -2,3.4
  rectangle: -1.6,0.2 -0.2,1.6
  rectangle: -5.2,2 -3.8,3.4
  rectangle: -5.2,0.2 -3.8,1.6
  region: 5.2,3.4 3.8,3.4 3.8,2 5.2,2
  region: 5.2,1.6 3.8,1.6 3.8,0.2 5.2,0.2
  region: 5.2,5.2 3.8,5.2 3.8,3.8 5.2,3.8
  rectangle: -5.2,3.8 -3.8,5.2
  rectangle: -3.4,3.8 -2,5.2
  region: -0.2,5.2 -1.6,5.2 -1.6,3.8 -0.2,3.8
  rectangle: 0.2,3.8 1.6,5.2
  region: 3.4,5.2 2,5.2 2,3.8 3.4,3.8
  region: 3.4,-3.8 2,-3.8 2,-5.2 3.4,-5.2
  rectangle: 0.2,-5.2 1.6,-3.8
  region: -0.2,-3.8 -1.6,-3.8 -1.6,-5.2 -0.2,-5.2
  rectangle: -3.4,-5.2 -2,-3.8
  rectangle: -5.2,-5.2 -3.8,-3.8
  region: 5.2,-3.8 3.8,-3.8 3.8,-5.2 5.2,-5.2
  region: 5.2,-0.2 3.8,-0.2 3.8,-1.6 5.2,-1.6
  region: 5.2,-2 3.8,-2 3.8,-3.4 5.2,-3.4
  rectangle: -5.2,-1.6 -3.8,-0.2
  rectangle: -5.2,-3.4 -3.8,-2
  rectangle: -1.6,-1.6 -0.2,-0.2
  rectangle: -3.4,-3.4 -2,-2
  region: -0.2,-2 -1.6,-2 -1.6,-3.4 -0.2,-3.4
  rectangle: -3.4,-1.6 -2,-0.2
  region: 3.4,-0.2 2,-0.2 2,-1.6 3.4,-1.6
  rectangle: 0.2,-3.4 1.6,-2
  region: 3.4,-2 2,-2 2,-3.4 3.4,-3.4
  region: 1.6,-0.2 0.2,-0.2 0.2,-1.6 1.6,-1.6
Top Designator:
  text ".Designator" at -3.71,-0.344 h1.52
Mechanical 13:
  circle w0.1: c-6.05,6.05 r0.5
  lines w0.1: -7,-7 -7,7 7,7 7,-7 -7,-7
3D body "User Library-IPC QFP-ful100l.step": height 1.15, standoff 0, extent -8.014,-8.014 8.014,8.014

## QFG50_128 [mm] "128-Leads, Body 20X14mm, Pitch 0.50mm"
pads (128):
  oval 1.8x0.3 smd mask+0.075: 1(-8,9.25) 2(-8,8.75) 3(-8,8.25) 4(-8,7.75) 5(-8,7.25) 6(-8,6.75) 7(-8,6.25) 8(-8,5.75) 9(-8,5.25) 10(-8,4.75) 11(-8,4.25) 12(-8,3.75) 13(-8,3.25) 14(-8,2.75) 15(-8,2.25) 16(-8,1.75) 17(-8,1.25) 18(-8,0.75) 19(-8,0.25) 20(-8,-0.25) 21(-8,-0.75) 22(-8,-1.25) 23(-8,-1.75) 24(-8,-2.25) 25(-8,-2.75) 26(-8,-3.25) 27(-8,-3.75) 28(-8,-4.25) 29(-8,-4.75) 30(-8,-5.25) 31(-8,-5.75) 32(-8,-6.25) 33(-8,-6.75) 34(-8,-7.25) 35(-8,-7.75) 36(-8,-8.25) 37(-8,-8.75) 38(-8,-9.25) 65(8,-9.25) 66(8,-8.75) 67(8,-8.25) 68(8,-7.75) 69(8,-7.25) 70(8,-6.75) 71(8,-6.25) 72(8,-5.75) 73(8,-5.25) 74(8,-4.75) 75(8,-4.25) 76(8,-3.75) 77(8,-3.25) 78(8,-2.75) 79(8,-2.25) 80(8,-1.75) 81(8,-1.25) 82(8,-0.75) 83(8,-0.25) 84(8,0.25) 85(8,0.75) 86(8,1.25) 87(8,1.75) 88(8,2.25) 89(8,2.75) 90(8,3.25) 91(8,3.75) 92(8,4.25) 93(8,4.75) 94(8,5.25) 95(8,5.75) 96(8,6.25) 97(8,6.75) 98(8,7.25) 99(8,7.75) 100(8,8.25) 101(8,8.75) 102(8,9.25)
  oval 0.3x1.8 smd mask+0.075: 39(-6.25,-11) 40(-5.75,-11) 41(-5.25,-11) 42(-4.75,-11) 43(-4.25,-11) 44(-3.75,-11) 45(-3.25,-11) 46(-2.75,-11) 47(-2.25,-11) 48(-1.75,-11) 49(-1.25,-11) 50(-0.75,-11) 51(-0.25,-11) 52(0.25,-11) 53(0.75,-11) 54(1.25,-11) 55(1.75,-11) 56(2.25,-11) 57(2.75,-11) 58(3.25,-11) 59(3.75,-11) 60(4.25,-11) 61(4.75,-11) 62(5.25,-11) 63(5.75,-11) 64(6.25,-11) 103(6.25,11) 104(5.75,11) 105(5.25,11) 106(4.75,11) 107(4.25,11) 108(3.75,11) 109(3.25,11) 110(2.75,11) 111(2.25,11) 112(1.75,11) 113(1.25,11) 114(0.75,11) 115(0.25,11) 116(-0.25,11) 117(-0.75,11) 118(-1.25,11) 119(-1.75,11) 120(-2.25,11) 121(-2.75,11) 122(-3.25,11) 123(-3.75,11) 124(-4.25,11) 125(-4.75,11) 126(-5.25,11) 127(-5.75,11) 128(-6.25,11)
Top Overlay:
  circle w0.2: c-6.2,9.249 r0.2
  circle w0.2: c-7.6,9.849 r0.2
  lines w0.2: -7.1,-9.6 -7.1,-10.1 -6.6,-10.1 ; -7.1,9.6 -7.1,10.1 -6.6,10.1 ; 6.6,-10.1 7.1,-10.1 7.1,-9.6 ; 6.6,10.1 7.1,10.1 7.1,9.6
Top Designator:
  text ".Designator" at -3.71,-0.344 h1.52
Mechanical 13:
  circle w0.1: c-6.05,9.05 r0.5
  lines w0.1: -7,-10 7,-10 7,10 -7,10 -7,-10
3D body "User Library-QFP5-128.step": height 2.9, standoff 0, extent -8.6,-11.6 8.6,11.6

## QFG50_128T [mm] "128-Leads, Body 20X14mm, Pitch 0.50mm"
height 3.4
pads (129):
  oval 1.8x0.3 smd mask+0.075: 1(-7.6,9.25) 2(-7.6,8.75) 3(-7.6,8.25) 4(-7.6,7.75) 5(-7.6,7.25) 6(-7.6,6.75) 7(-7.6,6.25) 8(-7.6,5.75) 9(-7.6,5.25) 10(-7.6,4.75) 11(-7.6,4.25) 12(-7.6,3.75) 13(-7.6,3.25) 14(-7.6,2.75) 15(-7.6,2.25) 16(-7.6,1.75) 17(-7.6,1.25) 18(-7.6,0.75) 19(-7.6,0.25) 20(-7.6,-0.25) 21(-7.6,-0.75) 22(-7.6,-1.25) 23(-7.6,-1.75) 24(-7.6,-2.25) 25(-7.6,-2.75) 26(-7.6,-3.25) 27(-7.6,-3.75) 28(-7.6,-4.25) 29(-7.6,-4.75) 30(-7.6,-5.25) 31(-7.6,-5.75) 32(-7.6,-6.25) 33(-7.6,-6.75) 34(-7.6,-7.25) 35(-7.6,-7.75) 36(-7.6,-8.25) 37(-7.6,-8.75) 38(-7.6,-9.25) 65(7.6,-9.25) 66(7.6,-8.75) 67(7.6,-8.25) 68(7.6,-7.75) 69(7.6,-7.25) 70(7.6,-6.75) 71(7.6,-6.25) 72(7.6,-5.75) 73(7.6,-5.25) 74(7.6,-4.75) 75(7.6,-4.25) 76(7.6,-3.75) 77(7.6,-3.25) 78(7.6,-2.75) 79(7.6,-2.25) 80(7.6,-1.75) 81(7.6,-1.25) 82(7.6,-0.75) 83(7.6,-0.25) 84(7.6,0.25) 85(7.6,0.75) 86(7.6,1.25) 87(7.6,1.75) 88(7.6,2.25) 89(7.6,2.75) 90(7.6,3.25) 91(7.6,3.75) 92(7.6,4.25) 93(7.6,4.75) 94(7.6,5.25) 95(7.6,5.75) 96(7.6,6.25) 97(7.6,6.75) 98(7.6,7.25) 99(7.6,7.75) 100(7.6,8.25) 101(7.6,8.75) 102(7.6,9.25)
  oval 0.3x1.8 smd mask+0.075: 39(-6.25,-11) 40(-5.75,-11) 41(-5.25,-11) 42(-4.75,-11) 43(-4.25,-11) 44(-3.75,-11) 45(-3.25,-11) 46(-2.75,-11) 47(-2.25,-11) 48(-1.75,-11) 49(-1.25,-11) 50(-0.75,-11) 51(-0.25,-11) 52(0.25,-11) 53(0.75,-11) 54(1.25,-11) 55(1.75,-11) 56(2.25,-11) 57(2.75,-11) 58(3.25,-11) 59(3.75,-11) 60(4.25,-11) 61(4.75,-11) 62(5.25,-11) 63(5.75,-11) 64(6.25,-11) 103(6.25,11) 104(5.75,11) 105(5.25,11) 106(4.75,11) 107(4.25,11) 108(3.75,11) 109(3.25,11) 110(2.75,11) 111(2.25,11) 112(1.75,11) 113(1.25,11) 114(0.75,11) 115(0.25,11) 116(-0.25,11) 117(-0.75,11) 118(-1.25,11) 119(-1.75,11) 120(-2.25,11) 121(-2.75,11) 122(-3.25,11) 123(-3.75,11) 124(-4.25,11) 125(-4.75,11) 126(-5.25,11) 127(-5.75,11) 128(-6.25,11)
  rect 9x13 smd paste-10 mask+0.1: 129(0,0)
Top Overlay:
  circle w0.2: c-6.2,9.249 r0.2
  circle w0.2: c-7.6,9.849 r0.2
  lines w0.2: -7.1,-9.6 -7.1,-10.1 -6.6,-10.1 ; -7.1,9.6 -7.1,10.1 -6.6,10.1 ; 6.6,-10.1 7.1,-10.1 7.1,-9.6 ; 6.6,10.1 7.1,10.1 7.1,9.6
Top Paste:
  rectangle: -1.6,0.2 -0.2,1.6
  region: -0.2,3.4 -1.6,3.4 -1.6,2 -0.2,2
  rectangle: -4,0.2 -2,1.6
  rectangle: 0.2,2 1.6,3.4
  region: 1.6,1.6 0.2,1.6 0.2,0.2 1.6,0.2
  rectangle: -4,2 -2,3.4
  rectangle: -4,3.8 -2,5.8
  region: 4,1.6 2,1.6 2,0.2 4,0.2
  region: 4,3.4 2,3.4 2,2 4,2
  rectangle: -1.6,3.8 -0.2,5.8
  rectangle: 2,3.8 4,5.8
  rectangle: 0.2,3.8 1.6,5.8
  rectangle: 0.2,-5.8 1.6,-3.8
  rectangle: 2,-5.8 4,-3.8
  rectangle: -1.6,-5.8 -0.2,-3.8
  region: 4,-2 2,-2 2,-3.4 4,-3.4
  region: 4,-0.2 2,-0.2 2,-1.6 4,-1.6
  rectangle: -4,-5.8 -2,-3.8
  rectangle: -4,-3.4 -2,-2
  region: 1.6,-0.2 0.2,-0.2 0.2,-1.6 1.6,-1.6
  rectangle: 0.2,-3.4 1.6,-2
  rectangle: -4,-1.6 -2,-0.2
  region: -0.2,-2 -1.6,-2 -1.6,-3.4 -0.2,-3.4
  rectangle: -1.6,-1.6 -0.2,-0.2
Top Designator:
  text ".Designator" at -3.71,-0.344 h1.52
Mechanical 13:
  circle w0.1: c-6.05,9.05 r0.5
  lines w0.1: -7,-10 7,-10 7,10 -7,10 -7,-10
3D body: height 3, standoff 0.05, extent -7,-10 7,10

## QFG50_144 [mm] "LQFP144, TQFP144, A144 (Cypress), HT144/TQ144 TQG144 (Xilinx), MS-026, MO-136(JEDEC), LQFP PGE, 20X20mm, Pitch 0.50mm, HT144, HTG144"
pads (144):
  oval 1.8x0.3 smd mask+0.075: 1(-10.8,8.75) 2(-10.8,8.25) 3(-10.8,7.75) 4(-10.8,7.25) 5(-10.8,6.75) 6(-10.8,6.25) 7(-10.8,5.75) 8(-10.8,5.25) 9(-10.8,4.75) 10(-10.8,4.25) 11(-10.8,3.75) 12(-10.8,3.25) 13(-10.8,2.75) 14(-10.8,2.25) 15(-10.8,1.75) 16(-10.8,1.25) 17(-10.8,0.75) 18(-10.8,0.25) 19(-10.8,-0.25) 20(-10.8,-0.75) 21(-10.8,-1.25) 22(-10.8,-1.75) 23(-10.8,-2.25) 24(-10.8,-2.75) 25(-10.8,-3.25) 26(-10.8,-3.75) 27(-10.8,-4.25) 28(-10.8,-4.75) 29(-10.8,-5.25) 30(-10.8,-5.75) 31(-10.8,-6.25) 32(-10.8,-6.75) 33(-10.8,-7.25) 34(-10.8,-7.75) 35(-10.8,-8.25) 36(-10.8,-8.75) 73(10.8,-8.75) 74(10.8,-8.25) 75(10.8,-7.75) 76(10.8,-7.25) 77(10.8,-6.75) 78(10.8,-6.25) 79(10.8,-5.75) 80(10.8,-5.25) 81(10.8,-4.75) 82(10.8,-4.25) 83(10.8,-3.75) 84(10.8,-3.25) 85(10.8,-2.75) 86(10.8,-2.25) 87(10.8,-1.75) 88(10.8,-1.25) 89(10.8,-0.75) 90(10.8,-0.25) 91(10.8,0.25) 92(10.8,0.75) 93(10.8,1.25) 94(10.8,1.75) 95(10.8,2.25) 96(10.8,2.75) 97(10.8,3.25) 98(10.8,3.75) 99(10.8,4.25) 100(10.8,4.75) 101(10.8,5.25) 102(10.8,5.75) 103(10.8,6.25) 104(10.8,6.75) 105(10.8,7.25) 106(10.8,7.75) 107(10.8,8.25) 108(10.8,8.75)
  oval 0.3x1.8 smd mask+0.075: 37(-8.75,-10.8) 38(-8.25,-10.8) 39(-7.75,-10.8) 40(-7.25,-10.8) 41(-6.75,-10.8) 42(-6.25,-10.8) 43(-5.75,-10.8) 44(-5.25,-10.8) 45(-4.75,-10.8) 46(-4.25,-10.8) 47(-3.75,-10.8) 48(-3.25,-10.8) 49(-2.75,-10.8) 50(-2.25,-10.8) 51(-1.75,-10.8) 52(-1.25,-10.8) 53(-0.75,-10.8) 54(-0.25,-10.8) 55(0.25,-10.8) 56(0.75,-10.8) 57(1.25,-10.8) 58(1.75,-10.8) 59(2.25,-10.8) 60(2.75,-10.8) 61(3.25,-10.8) 62(3.75,-10.8) 63(4.25,-10.8) 64(4.75,-10.8) 65(5.25,-10.8) 66(5.75,-10.8) 67(6.25,-10.8) 68(6.75,-10.8) 69(7.25,-10.8) 70(7.75,-10.8) 71(8.25,-10.8) 72(8.75,-10.8) 109(8.75,10.8) 110(8.25,10.8) 111(7.75,10.8) 112(7.25,10.8) 113(6.75,10.8) 114(6.25,10.8) 115(5.75,10.8) 116(5.25,10.8) 117(4.75,10.8) 118(4.25,10.8) 119(3.75,10.8) 120(3.25,10.8) 121(2.75,10.8) 122(2.25,10.8) 123(1.75,10.8) 124(1.25,10.8) 125(0.75,10.8) 126(0.25,10.8) 127(-0.25,10.8) 128(-0.75,10.8) 129(-1.25,10.8) 130(-1.75,10.8) 131(-2.25,10.8) 132(-2.75,10.8) 133(-3.25,10.8) 134(-3.75,10.8) 135(-4.25,10.8) 136(-4.75,10.8) 137(-5.25,10.8) 138(-5.75,10.8) 139(-6.25,10.8) 140(-6.75,10.8) 141(-7.25,10.8) 142(-7.75,10.8) 143(-8.25,10.8) 144(-8.75,10.8)
Top Overlay:
  circle w0.2: c-9.5,9.5 r0.2
  circle w0.2: c-10.7,9.5 r0.2
  lines w0.2: -10.1,-9 -10.1,-10.1 -9,-10.1 ; -10.1,9 -10.1,10.1 -9,10.1 ; 9,-10.1 10.1,-10.1 10.1,-9 ; 9,10.1 10.1,10.1 10.1,9
Top Designator:
  text ".Designator" at -3.71,-0.344 h1.52
3D body "User Library-LQFP144.STEP": height 0.89, standoff 0, extent 10,-8.86 11,8.86
3D body: height 1.2, standoff 0, extent -10,-10 10,10
3D body "User Library-LQFP144.STEP": height 0.89, standoff 0, extent -8.86,-11 8.86,-10
3D body "User Library-LQFP144.STEP": height 0.89, standoff 0, extent -8.86,10 8.86,11
3D body "User Library-LQFP144.STEP": height 0.89, standoff 0, extent -11,-8.86 -10,8.86